# Altium footprint library bno-055-footprint.PcbLib: 1 footprints
Each footprint in its own frame and in the unit in brackets; x right, y up, seen from the top. Pads: shape width x height; smd on the part's side, far side on the other; paste and mask are expansions set on the pad; w line width, h text height; cw(c..) or ccw(c..) is an arc to the next point about the centre after c.
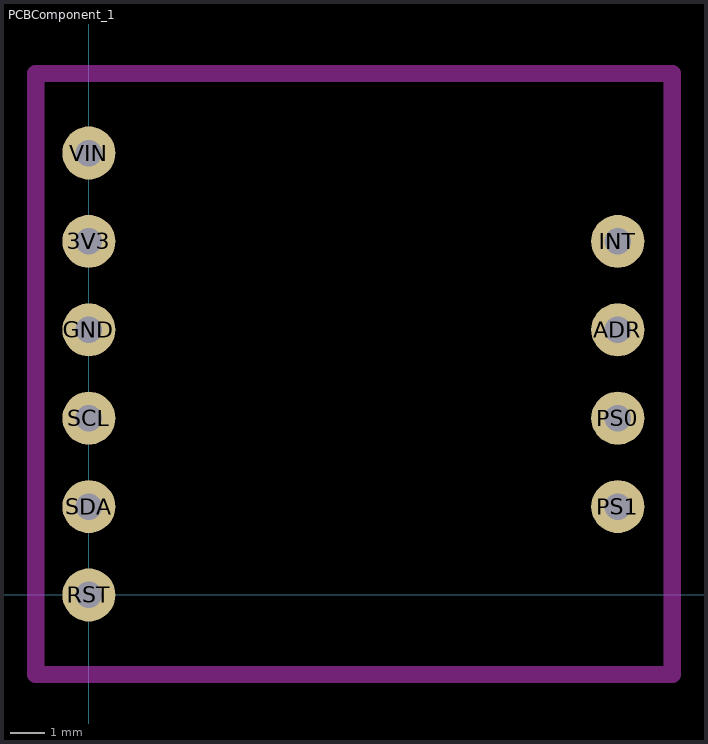
[diagram p0: the footprint, top view; thin cyan lines are the x and y axes]

## PCBComponent_1 [mil]
pads (10):
  round 60 hole 30: 3V3(0,400) ADR(598.43,300) GND(0,300) INT(598.43,400) PS0(598.43,200) PS1(598.43,100) RST(0,0) SCL(0,200) SDA(0,100) VIN(0,500)
Keep-Out Layer:
  lines w19.68: -60,545 -60,590 660,590 660,-90 -60,-90 -60,565